# EAGLE library part T50_QUAD_TRANSFORMER (library HansToroid)
Transformer (having 4 windings) on a T50 Toroid
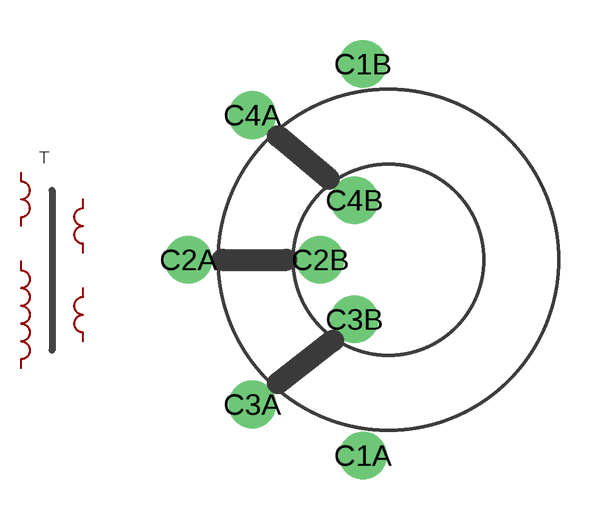
[diagram p0: symbol with the pads of T50_QUAD_TRANSFORMER; footprint T50_QUAD_TRANSFORMER]

Designator prefix T

## T50_QUAD_TRANSFORMERT50_4_TRANSFORMER  [T50_QUAD_TRANSFORMER]
C1A  C1A
C1B  C1B
C2A  C2A
C2B  C2B
C3A  C3A
C3B  C3B
C4A  C4A
C4B  C4B

## Footprint T50_QUAD_TRANSFORMER (pad centres in mm)
Transformer (having 4 windings) on a T50 Toroid
drill 0.6 pad 1.778: C1A -0.953,-7.303; C1B -0.953,7.303; C2A -7.461,0; C2B -2.54,0; C3A -5.08,-5.397; C3B -1.27,-2.223; C4A -5.08,5.397; C4B -1.27,2.223